# Altium footprint library TBP02R1-381-03GR.PcbLib: 2 footprints
Each footprint in its own frame and in the unit in brackets; x right, y up, seen from the top. Pads: shape width x height; smd on the part's side, far side on the other; paste and mask are expansions set on the pad; w line width, h text height; cw(c..) or ccw(c..) is an arc to the next point about the centre after c.
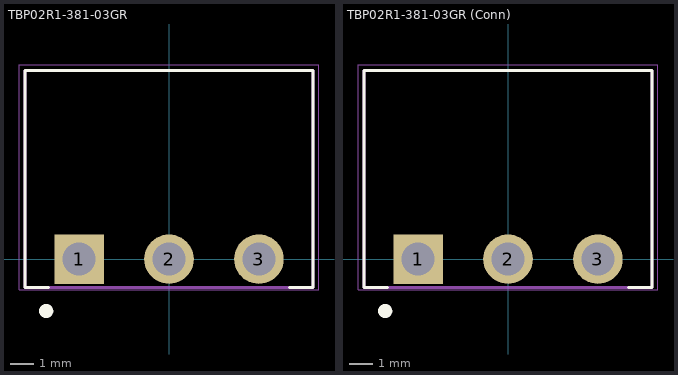
[diagram p0: the footprints below, top view; thin cyan lines are the x and y axes]

## TBP02R1-381-03GR [mm]
pads (3):
  rect 2.1x2.1 / inner round 2.1 / far side rect 2.1x2.1 hole 1.4 mask+0.102: 1(-3.81,0)
  round 2.1 hole 1.4 mask+0.102: 2(0,0) 3(3.81,0)
Top Overlay:
  circle w0.4: c-5.207,-2.2 r0.1
  lines w0.127: -5.11,-1.2 -6.11,-1.2 -6.11,8 6.11,8 6.11,-1.2 5.11,-1.2
Assembly Top:
  circle w0.2: c-5.207,-2.159 r0.1
  lines w0.127: -6.11,-1.2 6.11,-1.2 6.11,8 -6.11,8 -6.11,-1.2
Courtyard Top:
  lines w0.05: -6.36,-1.3 -6.36,8.25 6.36,8.25 6.36,-1.3 -6.36,-1.3
3D body "step_temp.STEP": height 7.25, standoff -3.45, extent -6.11,-1.2 6.11,8

## TBP02R1-381-03GR (Conn) [mm]
pads (3):
  rect 2.1x2.1 / inner round 2.1 / far side rect 2.1x2.1 hole 1.4 mask+0.102: 1(-3.81,0)
  round 2.1 hole 1.4 mask+0.102: 2(0,0) 3(3.81,0)
Top Overlay:
  circle w0.4: c-5.207,-2.2 r0.1
  lines w0.127: -5.11,-1.2 -6.11,-1.2 -6.11,8 6.11,8 6.11,-1.2 5.11,-1.2
Assembly Top:
  circle w0.2: c-5.207,-2.159 r0.1
  lines w0.127: -6.11,-1.2 6.11,-1.2 6.11,8 -6.11,8 -6.11,-1.2
Courtyard Top:
  lines w0.05: -6.36,-1.3 -6.36,8.25 6.36,8.25 6.36,-1.3 -6.36,-1.3
3D body "TBP02P1-381-03GR.STEP": height 7.75, standoff -3.45, extent -6.11,1.651 6.11,17.151
3D body "step_temp.STEP": height 7.25, standoff -3.45, extent -6.11,-1.2 6.11,8